# Altium footprint library FootPrintLib_11.PcbLib: 376 footprints (part 19 of 24)
Each footprint in its own frame and in the unit in brackets; x right, y up, seen from the top. Pads: shape width x height; smd on the part's side, far side on the other; paste and mask are expansions set on the pad; w line width, h text height; cw(c..) or ccw(c..) is an arc to the next point about the centre after c.
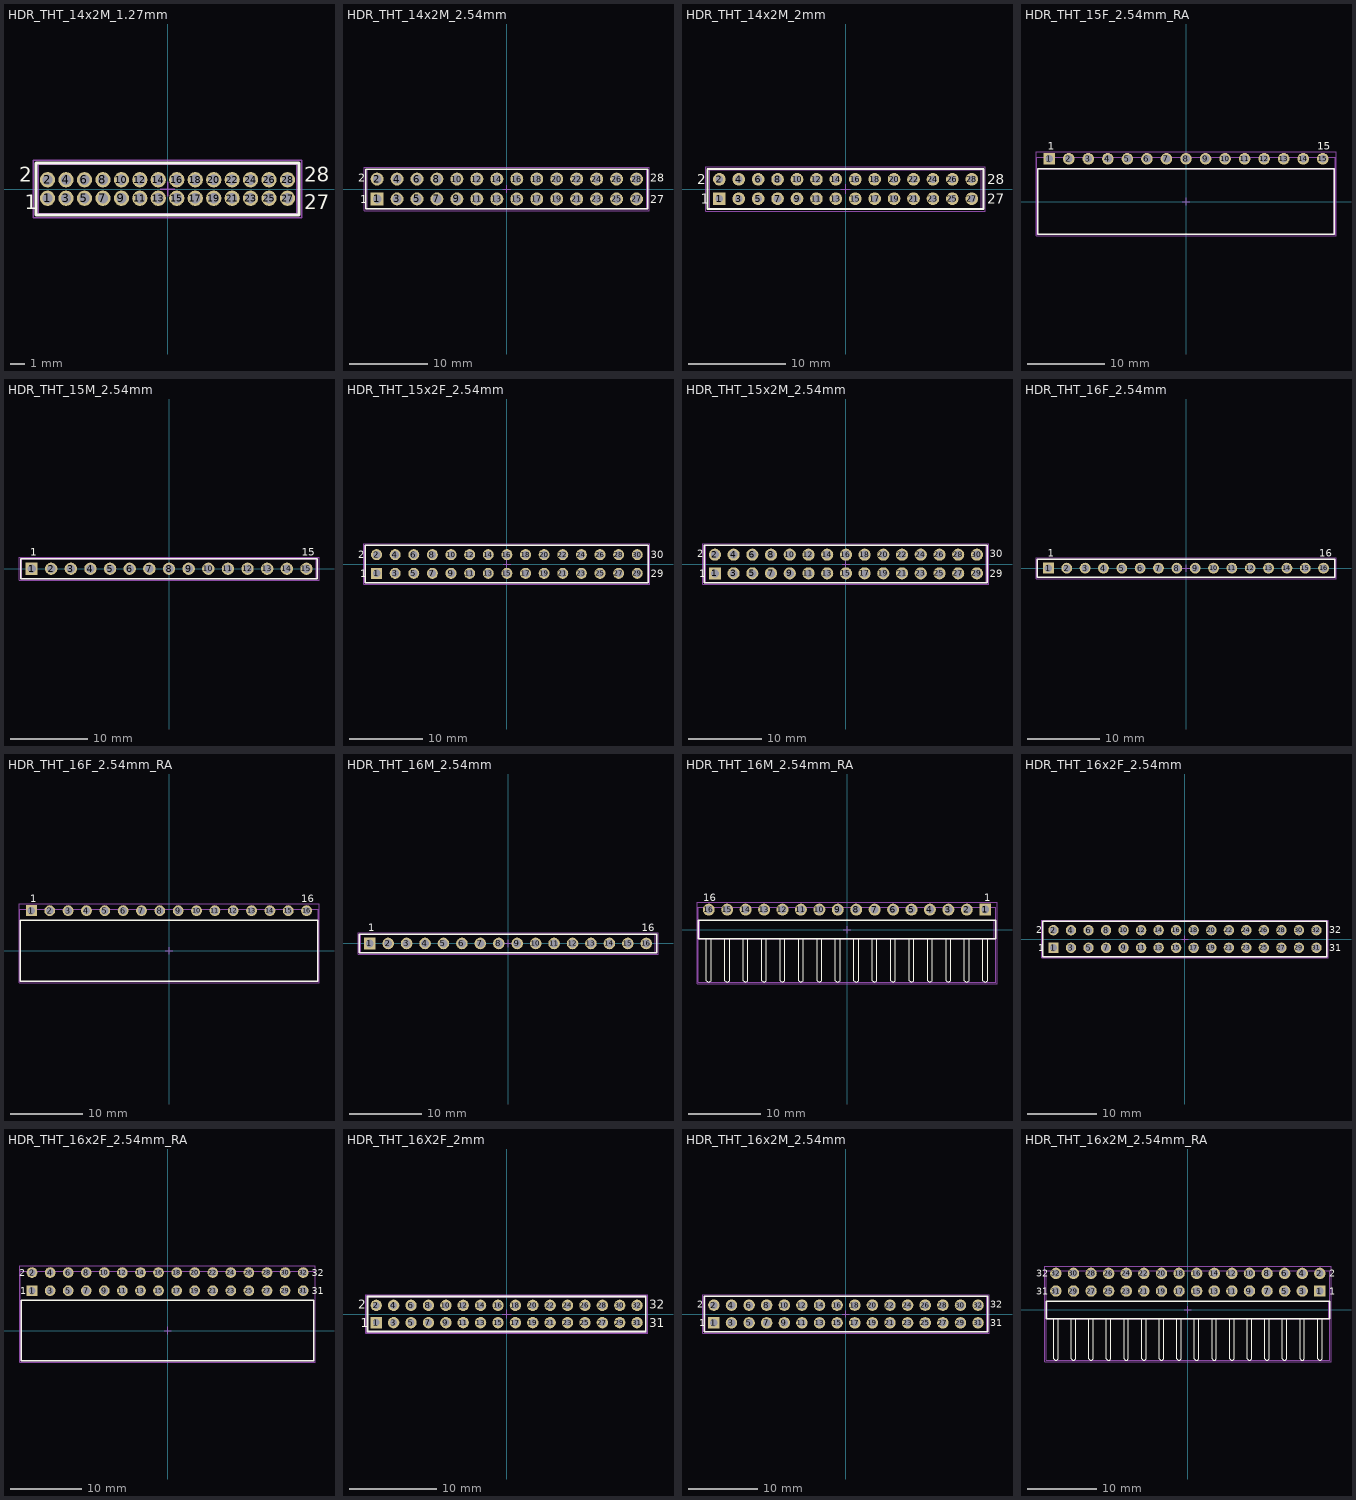
[diagram p18: the footprints below, top view; thin cyan lines are the x and y axes]

## HDR_THT_14x2M_1.27mm [mm] "Pin Header, pitch 1.27 mm, THT, Vertical, dual row, 28p"
height 5.65
pads (28):
  round 1.05 hole 0.7: 1(-8.255,-0.635) 2(-8.255,0.635) 3(-6.985,-0.635) 4(-6.985,0.635) 5(-5.715,-0.635) 6(-5.715,0.635) 7(-4.445,-0.635) 8(-4.445,0.635) 9(-3.175,-0.635) 10(-3.175,0.635) 11(-1.905,-0.635) 12(-1.905,0.635) 13(-0.635,-0.635) 14(-0.635,0.635) 15(0.635,-0.635) 16(0.635,0.635) 17(1.905,-0.635) 18(1.905,0.635) 19(3.175,-0.635) 20(3.175,0.635) 21(4.445,-0.635) 22(4.445,0.635) 23(5.715,-0.635) 24(5.715,0.635) 25(6.985,-0.635) 26(6.985,0.635) 27(8.255,-0.635) 28(8.255,0.635)
Top Overlay:
  lines w0.2: -9.04,-1.775 9.04,-1.775 9.04,1.775 -9.04,1.775 -9.04,-1.775
  text "2" at -10.22,0.5 h1
  text "1" at -9.82,-1.4 h1
  text "27" at 9.42,-1.4 h1
  text "28" at 9.42,0.5 h1
Mechanical 11:
  lines w0.1: -8.89,-1.7 8.89,-1.7 8.89,1.7 -8.89,1.7 -8.89,-1.7
Mechanical 13:
  lines w0.1: -9.04,-1.775 9.04,-1.775 9.04,1.775 -9.04,1.775 -9.04,-1.775
Mechanical 15:
  lines w0.1: -0.5,0 0.5,0 ; 0,-0.5 0,0.5 ; -9.24,-1.975 -9.24,1.975 9.24,1.975 9.24,-1.975 -9.24,-1.975
3D body "62202821121.stp": height 5.33, standoff -2.27, extent -8.89,-1.7 8.89,1.7

## HDR_THT_14x2M_2.54mm [mm] "Pin Header, pitch 2.54 mm, THT, Vertical, dual row, 28p"
height 8.54
pads (28):
  rect 1.65x1.65 hole 1.1: 1(-16.51,-1.27)
  round 1.65 hole 1.1: 2(-16.51,1.27) 3(-13.97,-1.27) 4(-13.97,1.27) 5(-11.43,-1.27) 6(-11.43,1.27) 7(-8.89,-1.27) 8(-8.89,1.27) 9(-6.35,-1.27) 10(-6.35,1.27) 11(-3.81,-1.27) 12(-3.81,1.27) 13(-1.27,-1.27) 14(-1.27,1.27) 15(1.27,-1.27) 16(1.27,1.27) 17(3.81,-1.27) 18(3.81,1.27) 19(6.35,-1.27) 20(6.35,1.27) 21(8.89,-1.27) 22(8.89,1.27) 23(11.43,-1.27) 24(11.43,1.27) 25(13.97,-1.27) 26(13.97,1.27) 27(16.51,-1.27) 28(16.51,1.27)
Top Overlay:
  lines w0.2: -17.93,-2.54 -17.93,2.54 17.93,2.54 17.93,-2.54 -17.93,-2.54
  text "2" at -18.94,0.9 h1
  text "1" at -18.64,-1.8 h1
  text "27" at 18.24,-1.8 h1
  text "28" at 18.24,0.9 h1
Mechanical 11:
  lines w0.1: -17.78,-2.54 -17.78,2.54 17.78,2.54 17.78,-2.54 -17.78,-2.54
Mechanical 13:
  lines w0.1: -17.93,-2.54 -17.93,2.54 17.93,2.54 17.93,-2.54 -17.93,-2.54
Mechanical 15:
  lines w0.1: -0.5,0 0.5,0 ; 0,-0.5 0,0.5 ; -18.13,-2.74 -18.13,2.74 18.13,2.74 18.13,-2.74 -18.13,-2.74
3D body "61302821121.stp": height 8.59, standoff -2.95, extent -17.78,-2.54 17.78,2.54

## HDR_THT_14x2M_2mm [mm] "2.00 mm THT Dual Pin Header, 28p"
height 6
pads (28):
  rect 1.3x1.3 hole 0.8: 1(-13,-1)
  round 1.3 hole 0.8: 2(-13,1) 3(-11,-1) 4(-11,1) 5(-9,-1) 6(-9,1) 7(-7,-1) 8(-7,1) 9(-5,-1) 10(-5,1) 11(-3,-1) 12(-3,1) 13(-1,-1) 14(-1,1) 15(1,-1) 16(1,1) 17(3,-1) 18(3,1) 19(5,-1) 20(5,1) 21(7,-1) 22(7,1) 23(9,-1) 24(9,1) 25(11,-1) 26(11,1) 27(13,-1) 28(13,1)
Top Overlay:
  lines w0.2: -14.2,-2.075 -14.2,2.075 14.2,2.075 14.2,-2.075 -14.2,-2.075
  text "1" at -14.9,-1.5 h1
  text "2" at -15.3,0.5 h1
  text "27" at 14.6,-1.5 h1
  text "28" at 14.6,0.5 h1
Mechanical 11:
  lines w0.1: -14,-2 -14,2 14,2 14,-2 -14,-2
Mechanical 13:
  lines w0.1: -14.2,-2.075 -14.2,2.075 14.2,2.075 14.2,-2.075 -14.2,-2.075
Mechanical 15:
  lines w0.1: -0.5,0 0.5,0 ; 0,-0.5 0,0.5 ; -14.4,-2.275 -14.4,2.275 14.4,2.275 14.4,-2.275 -14.4,-2.275
3D body "62002821121.stp": height 6.05, standoff -2.65, extent -14,-2 14,2

## HDR_THT_15F_2.54mm_RA [mm] "Socket Header, Pitch 2.54 mm, THT, Angled, single row, 15p"
height 2.5
pads (15):
  rect 1.5x1.5 hole 1.02: 1(-17.78,5.55)
  round 1.5 hole 1.02: 2(-15.24,5.55) 3(-12.7,5.55) 4(-10.16,5.55) 5(-7.62,5.55) 6(-5.08,5.55) 7(-2.54,5.55) 8(0,5.55) 9(2.54,5.55) 10(5.08,5.55) 11(7.62,5.55) 12(10.16,5.55) 13(12.7,5.55) 14(15.24,5.55) 15(17.78,5.55)
Top Overlay:
  lines w0.2: -19.3,-4.25 19.3,-4.25 19.3,4.25 -19.3,4.25 -19.3,-4.25
  text "15" at 17.04,6.7 h1
  text "1" at -17.94,6.7 h1
Mechanical 11:
  lines w0.1: -19.3,-4.25 -19.3,4.25 19.3,4.25 19.3,-4.25 -19.3,-4.25
Mechanical 13:
  lines w0.1: -19.425,-4.25 19.425,-4.25 19.425,5.75 -19.425,5.75 -19.425,-4.25
Mechanical 15:
  lines w0.1: -0.5,0 0.5,0 ; 0,-0.5 0,0.5 ; -19.5,-4.45 19.5,-4.45 19.5,6.5 -19.5,6.5 -19.5,-4.45
3D body "6130xx143121.stp": height 2.55, standoff -3.04, extent -19.3,-4.25 19.3,5.75

## HDR_THT_15M_2.54mm [mm] "Pin Header, pitch 2.54 mm, THT, Vertical, single row, 15p"
height 8.54
pads (15):
  rect 1.6x1.6 hole 1.1: 1(-17.78,0)
  round 1.6 hole 1.1: 2(-15.24,0) 3(-12.7,0) 4(-10.16,0) 5(-7.62,0) 6(-5.08,0) 7(-2.54,0) 8(0,0) 9(2.54,0) 10(5.08,0) 11(7.62,0) 12(10.16,0) 13(12.7,0) 14(15.24,0) 15(17.78,0)
Top Overlay:
  lines w0.2: -19.2,-1.27 -19.2,1.27 19.2,1.27 19.2,-1.27 -19.2,-1.27
  text "15" at 17.15,1.7 h1
  text "1" at -17.97,1.7 h1
Mechanical 11:
  lines w0.1: -19.05,-1.27 19.05,-1.27 19.05,1.27 -19.05,1.27 -19.05,-1.27
Mechanical 13:
  lines w0.1: -19.2,-1.27 -19.2,1.27 19.2,1.27 19.2,-1.27 -19.2,-1.27
Mechanical 15:
  lines w0.1: -0.5,0 0.5,0 ; 0,-0.5 0,0.5 ; -19.4,-1.47 -19.4,1.47 19.4,1.47 19.4,-1.47 -19.4,-1.47
3D body "61301511121.stp": height 8.57, standoff -2.97, extent -19.05,-1.27 19.05,1.27

## HDR_THT_15x2F_2.54mm [mm] "Socket Header, Pitch 2.54 mm, THT, Vertical, dual row, 30p"
height 8.4
pads (30):
  rect 1.5x1.5 hole 1.02: 1(-17.78,-1.27)
  round 1.5 hole 1.02: 2(-17.78,1.27) 3(-15.24,-1.27) 4(-15.24,1.27) 5(-12.7,-1.27) 6(-12.7,1.27) 7(-10.16,-1.27) 8(-10.16,1.27) 9(-7.62,-1.27) 10(-7.62,1.27) 11(-5.08,-1.27) 12(-5.08,1.27) 13(-2.54,-1.27) 14(-2.54,1.27) 15(0,-1.27) 16(0,1.27) 17(2.54,-1.27) 18(2.54,1.27) 19(5.08,-1.27) 20(5.08,1.27) 21(7.62,-1.27) 22(7.62,1.27) 23(10.16,-1.27) 24(10.16,1.27) 25(12.7,-1.27) 26(12.7,1.27) 27(15.24,-1.27) 28(15.24,1.27) 29(17.78,-1.27) 30(17.78,1.27)
Top Overlay:
  lines w0.2: -19.3,-2.54 -19.3,2.54 19.3,2.54 19.3,-2.54 -19.3,-2.54
  text "2" at -20.31,0.8 h1
  text "1" at -20.01,-1.8 h1
  text "29" at 19.61,-1.8 h1
  text "30" at 19.61,0.8 h1
Mechanical 11:
  lines w0.1: -19.3,-2.54 19.3,-2.54 19.3,2.54 -19.3,2.54 -19.3,-2.54
Mechanical 13:
  lines w0.1: -19.425,-2.54 -19.425,2.54 19.425,2.54 19.425,-2.54 -19.425,-2.54
Mechanical 15:
  lines w0.1: -0.5,0 0.5,0 ; 0,-0.5 0,0.5 ; -19.5,-2.74 -19.5,2.74 19.5,2.74 19.5,-2.74 -19.5,-2.74
3D body "61303021821.stp": height 8.45, standoff -3.05, extent -19.3,-2.54 19.3,2.54

## HDR_THT_15x2M_2.54mm [mm] "Pin Header, pitch 2.54 mm, THT, Vertical, dual row, 30p"
height 8.54
pads (30):
  rect 1.65x1.65 hole 1.1: 1(-17.78,-1.27)
  round 1.65 hole 1.1: 2(-17.78,1.27) 3(-15.24,-1.27) 4(-15.24,1.27) 5(-12.7,-1.27) 6(-12.7,1.27) 7(-10.16,-1.27) 8(-10.16,1.27) 9(-7.62,-1.27) 10(-7.62,1.27) 11(-5.08,-1.27) 12(-5.08,1.27) 13(-2.54,-1.27) 14(-2.54,1.27) 15(0,-1.27) 16(0,1.27) 17(2.54,-1.27) 18(2.54,1.27) 19(5.08,-1.27) 20(5.08,1.27) 21(7.62,-1.27) 22(7.62,1.27) 23(10.16,-1.27) 24(10.16,1.27) 25(12.7,-1.27) 26(12.7,1.27) 27(15.24,-1.27) 28(15.24,1.27) 29(17.78,-1.27) 30(17.78,1.27)
Top Overlay:
  lines w0.2: -19.2,-2.54 19.2,-2.54 19.2,2.54 -19.2,2.54 -19.2,-2.54
  text "1" at -19.91,-1.8 h1
  text "2" at -20.21,0.9 h1
  text "29" at 19.51,-1.8 h1
  text "30" at 19.51,0.9 h1
Mechanical 11:
  lines w0.1: -19.05,-2.54 19.05,-2.54 19.05,2.54 -19.05,2.54 -19.05,-2.54
Mechanical 13:
  lines w0.1: -19.2,-2.54 19.2,-2.54 19.2,2.54 -19.2,2.54 -19.2,-2.54
Mechanical 15:
  lines w0.1: -0.5,0 0.5,0 ; 0,-0.5 0,0.5 ; -19.4,-2.74 19.4,-2.74 19.4,2.74 -19.4,2.74 -19.4,-2.74
3D body "61303021121.stp": height 8.59, standoff -2.95, extent -19.05,-2.54 19.05,2.54

## HDR_THT_16F_2.54mm [mm] "Socket Header, Pitch 2.54 mm, THT, Vertical, single row, 16p"
height 8.5
pads (16):
  rect 1.5x1.5 hole 1.02: 1(-19.05,0)
  round 1.5 hole 1.02: 2(-16.51,0) 3(-13.97,0) 4(-11.43,0) 5(-8.89,0) 6(-6.35,0) 7(-3.81,0) 8(-1.27,0) 9(1.27,0) 10(3.81,0) 11(6.35,0) 12(8.89,0) 13(11.43,0) 14(13.97,0) 15(16.51,0) 16(19.05,0)
Top Overlay:
  lines w0.2: -20.57,-1.25 -20.57,1.25 20.57,1.25 20.57,-1.25 -20.57,-1.25
  text "1" at -19.14,1.6 h1
  text "16" at 18.42,1.6 h1
Mechanical 11:
  lines w0.1: -20.57,-1.25 -20.57,1.25 20.57,1.25 20.57,-1.25 -20.57,-1.25
Mechanical 13:
  lines w0.1: -20.695,-1.25 20.695,-1.25 20.695,1.25 -20.695,1.25 -20.695,-1.25
Mechanical 15:
  lines w0.1: -0.5,0 0.5,0 ; 0,-0.5 0,0.5 ; -20.77,-1.45 20.77,-1.45 20.77,1.45 -20.77,1.45 -20.77,-1.45
3D body "61301611821.stp": height 8.55, standoff -3.06, extent -20.57,-1.25 20.57,1.25

## HDR_THT_16F_2.54mm_RA [mm] "Socket Header, Pitch 2.54 mm, THT, Angled, single row, 16p"
height 2.5
pads (16):
  rect 1.5x1.5 hole 1.02: 1(-19.05,5.55)
  round 1.5 hole 1.02: 2(-16.51,5.55) 3(-13.97,5.55) 4(-11.43,5.55) 5(-8.89,5.55) 6(-6.35,5.55) 7(-3.81,5.55) 8(-1.27,5.55) 9(1.27,5.55) 10(3.81,5.55) 11(6.35,5.55) 12(8.89,5.55) 13(11.43,5.55) 14(13.97,5.55) 15(16.51,5.55) 16(19.05,5.55)
Top Overlay:
  lines w0.2: -20.57,-4.25 20.57,-4.25 20.57,4.25 -20.57,4.25 -20.57,-4.25
  text "1" at -19.21,6.7 h1
  text "16" at 18.31,6.7 h1
Mechanical 11:
  lines w0.1: -20.57,-4.25 -20.57,4.25 20.57,4.25 20.57,-4.25 -20.57,-4.25
Mechanical 13:
  lines w0.1: -20.695,-4.25 20.695,-4.25 20.695,5.75 -20.695,5.75 -20.695,-4.25
Mechanical 15:
  lines w0.1: -0.5,0 0.5,0 ; 0,-0.5 0,0.5 ; -20.77,-4.45 20.77,-4.45 20.77,6.5 -20.77,6.5 -20.77,-4.45
3D body "613016143121.stp": height 2.55, standoff -3.04, extent -20.57,-4.25 20.57,5.75

## HDR_THT_16M_2.54mm [mm] "Pin Header, pitch 2.54 mm, THT, Vertical, single row, 16p"
height 8.54
pads (16):
  rect 1.6x1.6 hole 1.1: 1(-19.05,0)
  round 1.6 hole 1.1: 2(-16.51,0) 3(-13.97,0) 4(-11.43,0) 5(-8.89,0) 6(-6.35,0) 7(-3.81,0) 8(-1.27,0) 9(1.27,0) 10(3.81,0) 11(6.35,0) 12(8.89,0) 13(11.43,0) 14(13.97,0) 15(16.51,0) 16(19.05,0)
Top Overlay:
  lines w0.2: -20.47,-1.27 20.47,-1.27 20.47,1.27 -20.47,1.27 -20.47,-1.27
  text "1" at -19.24,1.7 h1
  text "16" at 18.42,1.7 h1
Mechanical 11:
  lines w0.1: -20.32,-1.27 -20.32,1.27 20.32,1.27 20.32,-1.27 -20.32,-1.27
Mechanical 13:
  lines w0.1: -20.47,-1.27 20.47,-1.27 20.47,1.27 -20.47,1.27 -20.47,-1.27
Mechanical 15:
  lines w0.1: -0.5,0 0.5,0 ; 0,-0.5 0,0.5 ; -20.67,-1.47 20.67,-1.47 20.67,1.47 -20.67,1.47 -20.67,-1.47
3D body "61301611121.stp": height 8.57, standoff -2.97, extent -20.32,-1.27 20.32,1.27

## HDR_THT_16M_2.54mm_RA [mm] "Pin Header, pitch 2.54 mm, THT, Angled, single row, 16p"
height 2.54
pads (16):
  rect 1.65x1.65 hole 1.1: 1(19.05,2.77)
  round 1.65 hole 1.1: 2(16.51,2.77) 3(13.97,2.77) 4(11.43,2.77) 5(8.89,2.77) 6(6.35,2.77) 7(3.81,2.77) 8(1.27,2.77) 9(-1.27,2.77) 10(-3.81,2.77) 11(-6.35,2.77) 12(-8.89,2.77) 13(-11.43,2.77) 14(-13.97,2.77) 15(-16.51,2.77) 16(-19.05,2.77)
Top Overlay:
  lines w0.15: -19.37,-1.27 -19.37,-7.07 -19.05,-7.27 -18.73,-7.07 -18.73,-1.27 ; -16.83,-1.27 -16.83,-7.07 -16.51,-7.27 -16.19,-7.07 -16.19,-1.27 ; -14.29,-1.27 -14.29,-7.07 -13.97,-7.27 -13.65,-7.07 -13.65,-1.27 ; -11.75,-1.27 -11.75,-7.07 -11.43,-7.27 -11.11,-7.07 -11.11,-1.27 ; -9.21,-1.27 -9.21,-7.07 -8.89,-7.27 -8.57,-7.07 -8.57,-1.27 ; -6.67,-1.27 -6.67,-7.07 -6.35,-7.27 -6.03,-7.07 -6.03,-1.27 ; -4.13,-1.27 -4.13,-7.07 -3.81,-7.27 -3.49,-7.07 -3.49,-1.27 ; -1.59,-1.27 -1.59,-7.07 -1.27,-7.27 -0.95,-7.07 -0.95,-1.27 ; 0.95,-1.27 0.95,-7.07 1.27,-7.27 1.59,-7.07 1.59,-1.27 ; 3.49,-1.27 3.49,-7.07 3.81,-7.27 4.13,-7.07 4.13,-1.27 ; 6.03,-1.27 6.03,-7.07 6.35,-7.27 6.67,-7.07 6.67,-1.27 ; 8.57,-1.27 8.57,-7.07 8.89,-7.27 9.21,-7.07 9.21,-1.27 ; 11.11,-1.27 11.11,-7.07 11.43,-7.27 11.75,-7.07 11.75,-1.27 ; 13.65,-1.27 13.65,-7.07 13.97,-7.27 14.29,-7.07 14.29,-1.27 ; 16.19,-1.27 16.19,-7.07 16.51,-7.27 16.83,-7.07 16.83,-1.27 ; 18.73,-1.27 18.73,-7.07 19.05,-7.27 19.37,-7.07 19.37,-1.27
  lines w0.2: -20.47,-1.27 -20.47,1.27 20.47,1.27 20.47,-1.27 -20.47,-1.27
  text "16" at -19.82,3.9 h1
  text "1" at 18.88,3.9 h1
Mechanical 11:
  lines w0.1: -20.32,-1.27 -20.32,1.27 20.32,1.27 20.32,-1.27 -20.32,-1.27
Mechanical 13:
  lines w0.1: -20.47,-7.27 -20.47,3.09 20.47,3.09 20.47,-7.27 -20.47,-7.27
Mechanical 15:
  lines w0.1: -0.5,0 0.5,0 ; 0,-0.5 0,0.5 ; -20.67,-7.47 20.67,-7.47 20.67,3.795 -20.67,3.795 -20.67,-7.47
3D body "61301611021.stp": height 2.62, standoff -2.92, extent -20.32,-7.27 20.32,3.09

## HDR_THT_16x2F_2.54mm [mm] "Socket Header, Pitch 2.54 mm, THT, Vertical, dual row, 32p"
height 8.4
pads (32):
  rect 1.5x1.5 hole 1.02: 1(-19.05,-1.27)
  round 1.5 hole 1.02: 2(-19.05,1.27) 3(-16.51,-1.27) 4(-16.51,1.27) 5(-13.97,-1.27) 6(-13.97,1.27) 7(-11.43,-1.27) 8(-11.43,1.27) 9(-8.89,-1.27) 10(-8.89,1.27) 11(-6.35,-1.27) 12(-6.35,1.27) 13(-3.81,-1.27) 14(-3.81,1.27) 15(-1.27,-1.27) 16(-1.27,1.27) 17(1.27,-1.27) 18(1.27,1.27) 19(3.81,-1.27) 20(3.81,1.27) 21(6.35,-1.27) 22(6.35,1.27) 23(8.89,-1.27) 24(8.89,1.27) 25(11.43,-1.27) 26(11.43,1.27) 27(13.97,-1.27) 28(13.97,1.27) 29(16.51,-1.27) 30(16.51,1.27) 31(19.05,-1.27) 32(19.05,1.27)
Top Overlay:
  lines w0.2: -20.57,-2.54 -20.57,2.54 20.57,2.54 20.57,-2.54 -20.57,-2.54
  text "2" at -21.58,0.8 h1
  text "1" at -21.28,-1.8 h1
  text "31" at 20.88,-1.8 h1
  text "32" at 20.88,0.8 h1
Mechanical 11:
  lines w0.1: -20.57,-2.54 20.57,-2.54 20.57,2.54 -20.57,2.54 -20.57,-2.54
Mechanical 13:
  lines w0.1: -20.695,-2.54 -20.695,2.54 20.695,2.54 20.695,-2.54 -20.695,-2.54
Mechanical 15:
  lines w0.1: -0.5,0 0.5,0 ; 0,-0.5 0,0.5 ; -20.77,-2.74 -20.77,2.74 20.77,2.74 20.77,-2.74 -20.77,-2.74
3D body "61303221821.stp": height 8.45, standoff -3.05, extent -20.57,-2.54 20.57,2.54

## HDR_THT_16x2F_2.54mm_RA [mm] "Socket Header, Pitch 2.54 mm, THT, Angled, dual row, 32p"
height 5.08
pads (32):
  rect 1.5x1.5 hole 1.02: 1(-19.05,5.61)
  round 1.5 hole 1.02: 2(-19.05,8.15) 3(-16.51,5.61) 4(-16.51,8.15) 5(-13.97,5.61) 6(-13.97,8.15) 7(-11.43,5.61) 8(-11.43,8.15) 9(-8.89,5.61) 10(-8.89,8.15) 11(-6.35,5.61) 12(-6.35,8.15) 13(-3.81,5.61) 14(-3.81,8.15) 15(-1.27,5.61) 16(-1.27,8.15) 17(1.27,5.61) 18(1.27,8.15) 19(3.81,5.61) 20(3.81,8.15) 21(6.35,5.61) 22(6.35,8.15) 23(8.89,5.61) 24(8.89,8.15) 25(11.43,5.61) 26(11.43,8.15) 27(13.97,5.61) 28(13.97,8.15) 29(16.51,5.61) 30(16.51,8.15) 31(19.05,5.61) 32(19.05,8.15)
Top Overlay:
  lines w0.2: -20.57,-4.25 -20.57,4.25 20.57,4.25 20.57,-4.25 -20.57,-4.25
  text "2" at -20.88,7.6 h1
  text "1" at -20.68,5.1 h1
  text "31" at 20.28,5.1 h1
  text "32" at 20.28,7.6 h1
Mechanical 11:
  lines w0.1: -20.57,-4.25 20.57,-4.25 20.57,4.25 -20.57,4.25 -20.57,-4.25
Mechanical 13:
  lines w0.1: -20.72,-4.25 20.72,-4.25 20.72,8.35 -20.72,8.35 -20.72,-4.25
Mechanical 15:
  lines w0.1: -0.5,0 0.5,0 ; 0,-0.5 0,0.5 ; -20.77,-4.45 20.77,-4.45 20.77,9.1 -20.77,9.1 -20.77,-4.45
3D body "613032243121.stp": height 5.05, standoff -3.25, extent -20.57,-4.25 20.57,8.35

## HDR_THT_16X2F_2mm [mm] "Socket Header, Pitch 2.00 mm, THT, Vertical, dual row, 32p"
height 4.45
pads (32):
  rect 1.3x1.3 hole 0.8: 1(-15,-1)
  round 1.3 hole 0.8: 2(-15,1) 3(-13,-1) 4(-13,1) 5(-11,-1) 6(-11,1) 7(-9,-1) 8(-9,1) 9(-7,-1) 10(-7,1) 11(-5,-1) 12(-5,1) 13(-3,-1) 14(-3,1) 15(-1,-1) 16(-1,1) 17(1,-1) 18(1,1) 19(3,-1) 20(3,1) 21(5,-1) 22(5,1) 23(7,-1) 24(7,1) 25(9,-1) 26(9,1) 27(11,-1) 28(11,1) 29(13,-1) 30(13,1) 31(15,-1) 32(15,1)
Top Overlay:
  lines w0.2: -16,-2 16,-2 16,2 -16,2 -16,-2
  text "31" at 16.4,-1.5 h1
  text "32" at 16.4,0.6 h1
  text "2" at -17.1,0.6 h1
  text "1" at -16.8,-1.5 h1
Mechanical 11:
  lines w0.1: -16,-2 16,-2 16,2 -16,2 -16,-2
Mechanical 13:
  lines w0.1: -16.15,-2.075 16.15,-2.075 16.15,2.075 -16.15,2.075 -16.15,-2.075
Mechanical 15:
  lines w0.1: -0.5,0 0.5,0 ; 0,-0.5 0,0.5 ; -16.2,-2.2 16.2,-2.2 16.2,2.2 -16.2,2.2 -16.2,-2.2
3D body "62003221821.stp": height 4.35, standoff -2.35, extent -16.25,-2 16.25,2

## HDR_THT_16x2M_2.54mm [mm] "Pin Header, pitch 2.54 mm, THT, Vertical, dual row, 32p"
height 8.54
pads (32):
  rect 1.65x1.65 hole 1.1: 1(-19.05,-1.27)
  round 1.65 hole 1.1: 2(-19.05,1.27) 3(-16.51,-1.27) 4(-16.51,1.27) 5(-13.97,-1.27) 6(-13.97,1.27) 7(-11.43,-1.27) 8(-11.43,1.27) 9(-8.89,-1.27) 10(-8.89,1.27) 11(-6.35,-1.27) 12(-6.35,1.27) 13(-3.81,-1.27) 14(-3.81,1.27) 15(-1.27,-1.27) 16(-1.27,1.27) 17(1.27,-1.27) 18(1.27,1.27) 19(3.81,-1.27) 20(3.81,1.27) 21(6.35,-1.27) 22(6.35,1.27) 23(8.89,-1.27) 24(8.89,1.27) 25(11.43,-1.27) 26(11.43,1.27) 27(13.97,-1.27) 28(13.97,1.27) 29(16.51,-1.27) 30(16.51,1.27) 31(19.05,-1.27) 32(19.05,1.27)
Top Overlay:
  lines w0.2: -20.47,-2.54 -20.47,2.54 20.47,2.54 20.47,-2.54 -20.47,-2.54
  text "2" at -21.48,0.9 h1
  text "1" at -21.18,-1.8 h1
  text "31" at 20.78,-1.8 h1
  text "32" at 20.78,0.9 h1
Mechanical 11:
  lines w0.1: -20.32,-2.54 -20.32,2.54 20.32,2.54 20.32,-2.54 -20.32,-2.54
Mechanical 13:
  lines w0.1: -20.47,-2.54 -20.47,2.54 20.47,2.54 20.47,-2.54 -20.47,-2.54
Mechanical 15:
  lines w0.1: -0.5,0 0.5,0 ; 0,-0.5 0,0.5 ; -20.67,-2.74 -20.67,2.74 20.67,2.74 20.67,-2.74 -20.67,-2.74
3D body "61303221121.stp": height 8.59, standoff -2.95, extent -20.32,-2.54 20.32,2.54

## HDR_THT_16x2M_2.54mm_RA [mm] "Pin Header, pitch 2.54 mm, THT, Angled, dual row, 32p"
height 5.08
pads (32):
  rect 1.65x1.65 hole 1.1: 1(19.05,2.73)
  round 1.65 hole 1.1: 2(19.05,5.27) 3(16.51,2.73) 4(16.51,5.27) 5(13.97,2.73) 6(13.97,5.27) 7(11.43,2.73) 8(11.43,5.27) 9(8.89,2.73) 10(8.89,5.27) 11(6.35,2.73) 12(6.35,5.27) 13(3.81,2.73) 14(3.81,5.27) 15(1.27,2.73) 16(1.27,5.27) 17(-1.27,2.73) 18(-1.27,5.27) 19(-3.81,2.73) 20(-3.81,5.27) 21(-6.35,2.73) 22(-6.35,5.27) 23(-8.89,2.73) 24(-8.89,5.27) 25(-11.43,2.73) 26(-11.43,5.27) 27(-13.97,2.73) 28(-13.97,5.27) 29(-16.51,2.73) 30(-16.51,5.27) 31(-19.05,2.73) 32(-19.05,5.27)
Top Overlay:
  lines w0.15: -19.37,-1.335 -19.37,-7.07 -19.17,-7.27 -18.93,-7.27 -18.73,-7.07 -18.73,-1.31 ; -16.83,-1.335 -16.83,-7.07 -16.63,-7.27 -16.39,-7.27 -16.19,-7.07 -16.19,-1.31 ; -14.29,-1.335 -14.29,-7.07 -14.09,-7.27 -13.85,-7.27 -13.65,-7.07 -13.65,-1.31 ; -11.75,-1.335 -11.75,-7.07 -11.55,-7.27 -11.31,-7.27 -11.11,-7.07 -11.11,-1.31 ; -9.21,-1.335 -9.21,-7.07 -9.01,-7.27 -8.77,-7.27 -8.57,-7.07 -8.57,-1.31 ; -6.67,-1.335 -6.67,-7.07 -6.47,-7.27 -6.23,-7.27 -6.03,-7.07 -6.03,-1.31 ; -4.13,-1.335 -4.13,-7.07 -3.93,-7.27 -3.69,-7.27 -3.49,-7.07 -3.49,-1.31 ; -1.59,-1.335 -1.59,-7.07 -1.39,-7.27 -1.15,-7.27 -0.95,-7.07 -0.95,-1.31 ; 0.95,-1.335 0.95,-7.07 1.15,-7.27 1.39,-7.27 1.59,-7.07 1.59,-1.31 ; 3.49,-1.335 3.49,-7.07 3.69,-7.27 3.93,-7.27 4.13,-7.07 4.13,-1.31 ; 6.03,-1.335 6.03,-7.07 6.23,-7.27 6.47,-7.27 6.67,-7.07 6.67,-1.31 ; 8.57,-1.335 8.57,-7.07 8.77,-7.27 9.01,-7.27 9.21,-7.07 9.21,-1.31 ; 11.11,-1.335 11.11,-7.07 11.31,-7.27 11.55,-7.27 11.75,-7.07 11.75,-1.31 ; 13.65,-1.335 13.65,-7.07 13.85,-7.27 14.09,-7.27 14.29,-7.07 14.29,-1.31 ; 16.19,-1.335 16.19,-7.07 16.39,-7.27 16.63,-7.27 16.83,-7.07 16.83,-1.31 ; 18.73,-1.335 18.73,-7.07 18.93,-7.27 19.17,-7.27 19.37,-7.07 19.37,-1.31
  lines w0.2: -20.47,-1.27 20.47,-1.27 20.47,1.27 -20.47,1.27 -20.47,-1.27
  text "32" at -21.92,4.8 h1
  text "31" at -21.92,2.2 h1
  text "2" at 20.38,4.8 h1
  text "1" at 20.38,2.2 h1
Mechanical 11:
  lines w0.1: -20.32,-1.27 20.32,-1.27 20.32,1.27 -20.32,1.27 -20.32,-1.27
Mechanical 13:
  lines w0.1: -20.47,-7.27 -20.47,5.63 20.47,5.63 20.47,-7.27 -20.47,-7.27
Mechanical 15:
  lines w0.1: -0.5,0 0.5,0 ; 0,-0.5 0,0.5 ; -20.67,-7.47 -20.67,6.295 20.67,6.295 20.67,-7.47 -20.67,-7.47
3D body "61303221021.stp": height 5.14, standoff -2.94, extent -20.32,-7.27 20.32,5.63